# Altium footprint library WE-VD.PcbLib: 120 footprints (part 3 of 8)
Each footprint in its own frame and in the unit in brackets; x right, y up, seen from the top. Pads: shape width x height; smd on the part's side, far side on the other; paste and mask are expansions set on the pad; w line width, h text height; cw(c..) or ccw(c..) is an arc to the next point about the centre after c.
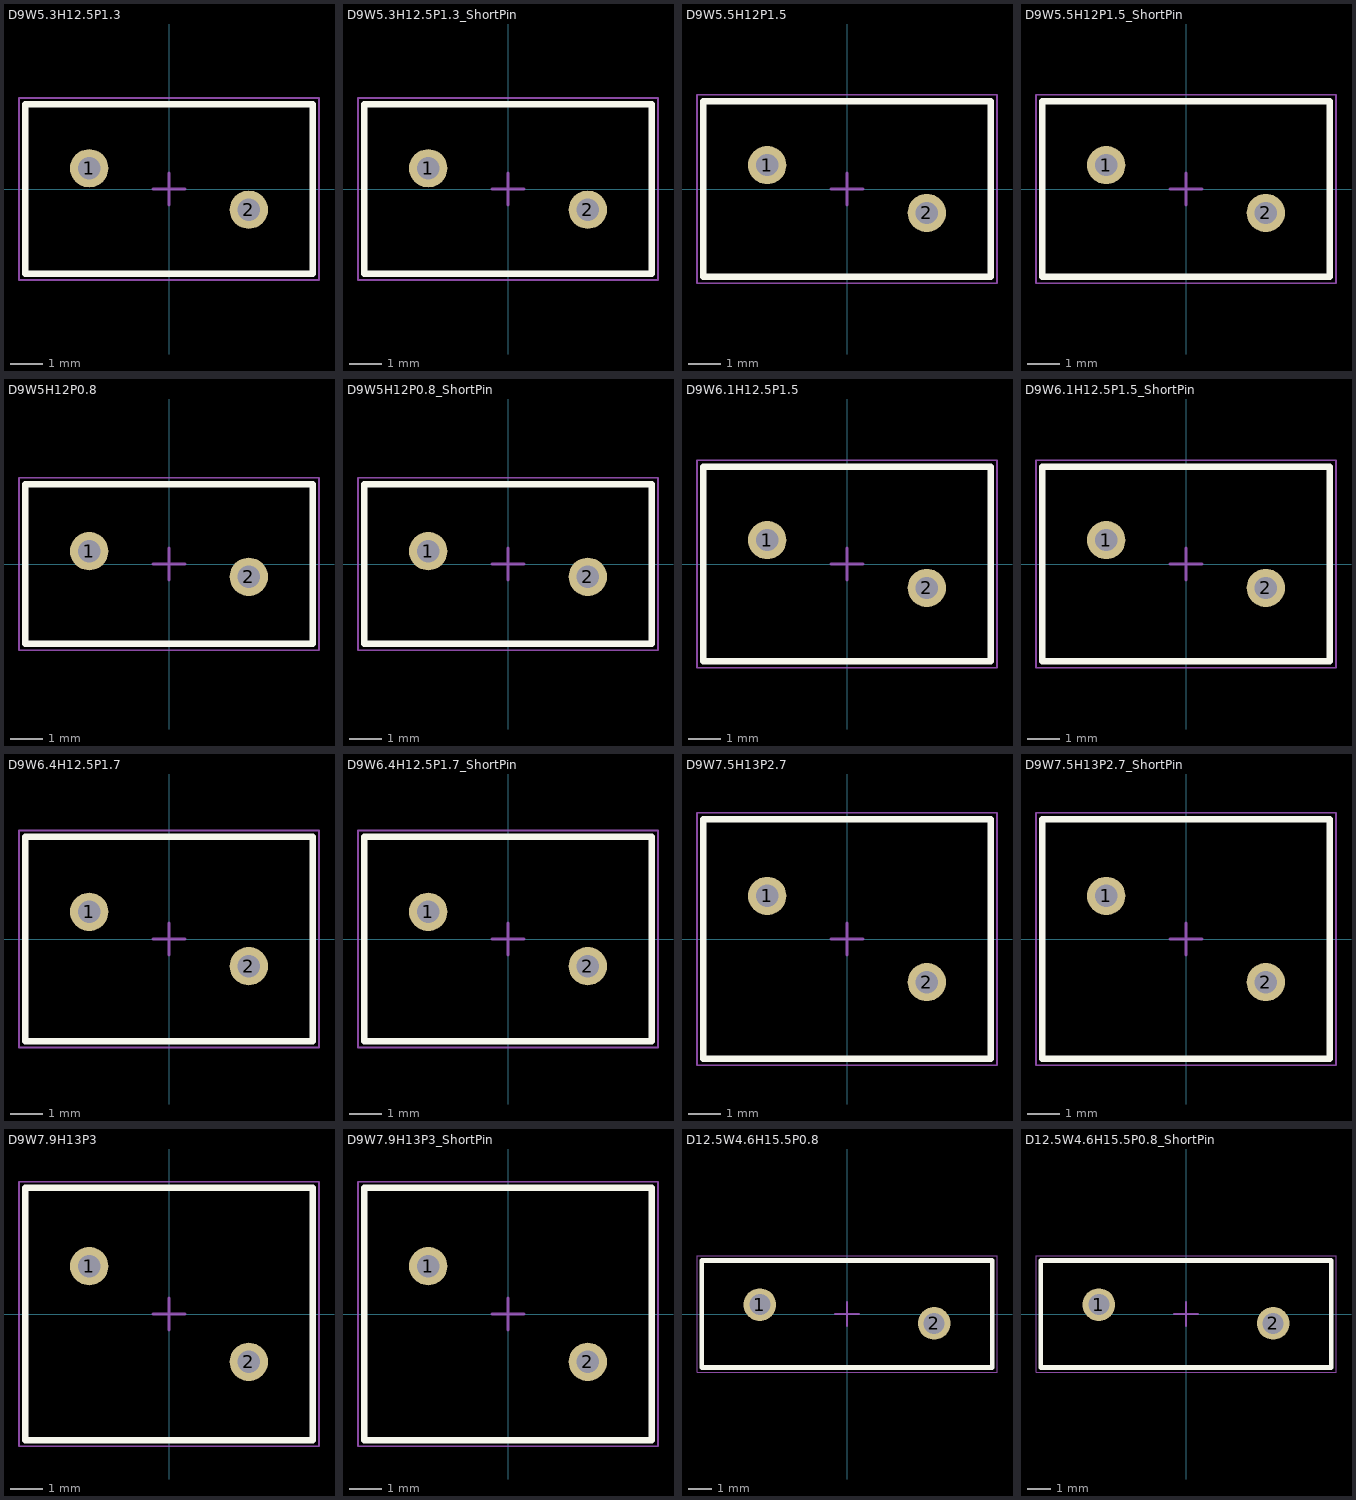
[diagram p2: the footprints below, top view; thin cyan lines are the x and y axes]

## D9W5.3H12.5P1.3 [mm] "Disk Varistor, Diameter 9mm, Width 5.3mm"
height 12.5
pads (2):
  round 1.2 hole 0.7: 1(-2.5,0.65) 2(2.5,-0.65)
Top Overlay:
  lines w0.2: -4.5,-2.65 -4.5,2.65 4.5,2.65 4.5,-2.65 -4.5,-2.65
Top Assembly:
  lines w0.1: -4.5,-2.65 4.5,-2.65 4.5,2.65 -4.5,2.65 -4.5,-2.65
Top Designator:
  text ".Designator" at -3.647,-0.357 h1
Top 3D Body:
  lines w0.1: -4.5,-2.65 4.5,-2.65 4.5,2.65 -4.5,2.65 -4.5,-2.65
Top Courtyard:
  lines w0.05: -4.7,-2.85 -4.7,2.85 4.7,2.85 4.7,-2.85 -4.7,-2.85
Top Component Center:
  lines w0.1: -0.5,0 0.5,0 ; 0,-0.5 0,0.5
3D body "820x72511.stp": height 9.7, standoff -22.7, extent -3.696,-1.85 3.696,1.85

## D9W5.3H12.5P1.3_ShortPin [mm] "Disk Varistor, Diameter 9mm, Width 5.3mm"
height 12.5
pads (2):
  round 1.2 hole 0.7: 1(-2.5,0.65) 2(2.5,-0.65)
Top Overlay:
  lines w0.2: -4.5,-2.65 4.5,-2.65 4.5,2.65 -4.5,2.65 -4.5,-2.65
Top Assembly:
  lines w0.1: -4.5,-2.65 -4.5,2.65 4.5,2.65 4.5,-2.65 -4.5,-2.65
Top Designator:
  text ".Designator" at -3.647,-0.357 h1
Top 3D Body:
  lines w0.1: -4.5,-2.65 -4.5,2.65 4.5,2.65 4.5,-2.65 -4.5,-2.65
Top Courtyard:
  lines w0.05: -4.7,-2.85 4.7,-2.85 4.7,2.85 -4.7,2.85 -4.7,-2.85
Top Component Center:
  lines w0.1: -0.5,0 0.5,0 ; 0,-0.5 0,0.5
3D body "820572511.stp": height 11.5, standoff -3.1, extent -4.5,-2.65 4.5,2.65

## D9W5.5H12P1.5 [mm] "Disk Varistor, Diameter 9mm, Width 5.5mm"
height 12
pads (2):
  round 1.2 hole 0.7: 1(-2.5,0.75) 2(2.5,-0.75)
Top Overlay:
  lines w0.2: -4.5,-2.75 4.5,-2.75 4.5,2.75 -4.5,2.75 -4.5,-2.75
Top Assembly:
  lines w0.1: -4.5,-2.75 -4.5,2.75 4.5,2.75 4.5,-2.75 -4.5,-2.75
Top Designator:
  text ".Designator" at -3.647,-0.357 h1
Top 3D Body:
  lines w0.1: -4.5,-2.75 -4.5,2.75 4.5,2.75 4.5,-2.75 -4.5,-2.75
Top Courtyard:
  lines w0.05: -4.7,-2.95 4.7,-2.95 4.7,2.95 -4.7,2.95 -4.7,-2.95
Top Component Center:
  lines w0.1: -0.5,0 0.5,0 ; 0,-0.5 0,0.5
3D body "820x74001.stp": height 9.7, standoff -22.7, extent -3.696,-1.9 3.696,1.9

## D9W5.5H12P1.5_ShortPin [mm] "Disk Varistor, Diameter 9mm, Width 5.5mm"
height 12
pads (2):
  round 1.2 hole 0.7: 1(-2.5,0.75) 2(2.5,-0.75)
Top Overlay:
  lines w0.2: -4.5,-2.75 -4.5,2.75 4.5,2.75 4.5,-2.75 -4.5,-2.75
Top Assembly:
  lines w0.1: -4.5,-2.75 4.5,-2.75 4.5,2.75 -4.5,2.75 -4.5,-2.75
Top Designator:
  text ".Designator" at -3.647,-0.357 h1
Top 3D Body:
  lines w0.1: -4.5,-2.75 4.5,-2.75 4.5,2.75 -4.5,2.75 -4.5,-2.75
Top Courtyard:
  lines w0.05: -4.7,-2.95 -4.7,2.95 4.7,2.95 4.7,-2.95 -4.7,-2.95
Top Component Center:
  lines w0.1: -0.5,0 0.5,0 ; 0,-0.5 0,0.5
3D body "820574001.stp": height 11.5, standoff -3.1, extent -4.5,-2.75 4.5,2.75

## D9W5H12P0.8 [mm] "Disk Varistor, Diameter 9mm, Width 5mm"
height 12
pads (2):
  round 1.2 hole 0.7: 1(-2.5,0.4) 2(2.5,-0.4)
Top Overlay:
  lines w0.2: -4.5,-2.5 -4.5,2.5 4.5,2.5 4.5,-2.5 -4.5,-2.5
Top Assembly:
  lines w0.1: -4.5,-2.5 4.5,-2.5 4.5,2.5 -4.5,2.5 -4.5,-2.5
Top Designator:
  text ".Designator" at -3.647,-0.357 h1
Top 3D Body:
  lines w0.1: -4.5,-2.5 4.5,-2.5 4.5,2.5 -4.5,2.5 -4.5,-2.5
Top Courtyard:
  lines w0.05: -4.7,-2.7 -4.7,2.7 4.7,2.7 4.7,-2.7 -4.7,-2.7
Top Component Center:
  lines w0.1: -0.5,0 0.5,0 ; 0,-0.5 0,0.5
3D body "820x73001.stp": height 9.7, standoff -22.7, extent -3.696,-1.6 3.696,1.6

## D9W5H12P0.8_ShortPin [mm] "Disk Varistor, Diameter 9mm, Width 5mm"
height 12
pads (2):
  round 1.2 hole 0.7: 1(-2.5,0.4) 2(2.5,-0.4)
Top Overlay:
  lines w0.2: -4.5,-2.5 4.5,-2.5 4.5,2.5 -4.5,2.5 -4.5,-2.5
Top Assembly:
  lines w0.1: -4.5,-2.5 -4.5,2.5 4.5,2.5 4.5,-2.5 -4.5,-2.5
Top Designator:
  text ".Designator" at -3.647,-0.357 h1
Top 3D Body:
  lines w0.1: -4.5,-2.5 -4.5,2.5 4.5,2.5 4.5,-2.5 -4.5,-2.5
Top Courtyard:
  lines w0.05: -4.7,-2.7 4.7,-2.7 4.7,2.7 -4.7,2.7 -4.7,-2.7
Top Component Center:
  lines w0.1: -0.5,0 0.5,0 ; 0,-0.5 0,0.5
3D body "820573001.stp": height 11.5, standoff -3.1, extent -4.5,-2.5 4.5,2.5

## D9W6.1H12.5P1.5 [mm] "Disk Varistor, Diameter 9mm, Width 6.1mm"
height 12.5
pads (2):
  round 1.2 hole 0.7: 1(-2.5,0.75) 2(2.5,-0.75)
Top Overlay:
  lines w0.2: -4.5,-3.05 4.5,-3.05 4.5,3.05 -4.5,3.05 -4.5,-3.05
Top Assembly:
  lines w0.1: -4.5,-3.05 -4.5,3.05 4.5,3.05 4.5,-3.05 -4.5,-3.05
Top Designator:
  text ".Designator" at -3.647,-0.357 h1
Top 3D Body:
  lines w0.1: -4.5,-3.05 -4.5,3.05 4.5,3.05 4.5,-3.05 -4.5,-3.05
Top Courtyard:
  lines w0.05: -4.7,-3.25 4.7,-3.25 4.7,3.25 -4.7,3.25 -4.7,-3.25
Top Component Center:
  lines w0.1: -0.5,0 0.5,0 ; 0,-0.5 0,0.5
3D body "820x72711.stp": height 9.7, standoff -22.7, extent -3.696,-1.95 3.696,1.95

## D9W6.1H12.5P1.5_ShortPin [mm] "Disk Varistor, Diameter 9mm, Width 6.1mm"
height 12.5
pads (2):
  round 1.2 hole 0.7: 1(-2.5,0.75) 2(2.5,-0.75)
Top Overlay:
  lines w0.2: -4.5,-3.05 -4.5,3.05 4.5,3.05 4.5,-3.05 -4.5,-3.05
Top Assembly:
  lines w0.1: -4.5,-3.05 4.5,-3.05 4.5,3.05 -4.5,3.05 -4.5,-3.05
Top Designator:
  text ".Designator" at -3.647,-0.357 h1
Top 3D Body:
  lines w0.1: -4.5,-3.05 4.5,-3.05 4.5,3.05 -4.5,3.05 -4.5,-3.05
Top Courtyard:
  lines w0.05: -4.7,-3.25 -4.7,3.25 4.7,3.25 4.7,-3.25 -4.7,-3.25
Top Component Center:
  lines w0.1: -0.5,0 0.5,0 ; 0,-0.5 0,0.5
3D body "820572711.stp": height 12, standoff -3.1, extent -4.5,-3.05 4.5,3.05

## D9W6.4H12.5P1.7 [mm] "Disk Varistor, Diameter 9mm, Width 6.4mm"
height 12.5
pads (2):
  round 1.2 hole 0.7: 1(-2.5,0.85) 2(2.5,-0.85)
Top Overlay:
  lines w0.2: -4.5,-3.2 4.5,-3.2 4.5,3.2 -4.5,3.2 -4.5,-3.2
Top Assembly:
  lines w0.1: -4.5,-3.2 -4.5,3.2 4.5,3.2 4.5,-3.2 -4.5,-3.2
Top Designator:
  text ".Designator" at -3.647,-0.357 h1
Top 3D Body:
  lines w0.1: -4.5,-3.2 -4.5,3.2 4.5,3.2 4.5,-3.2 -4.5,-3.2
Top Courtyard:
  lines w0.05: -4.7,-3.4 4.7,-3.4 4.7,3.4 -4.7,3.4 -4.7,-3.4
Top Component Center:
  lines w0.1: -0.5,0 0.5,0 ; 0,-0.5 0,0.5
3D body "820x73011.stp": height 9.7, standoff -22.7, extent -3.696,-2.05 3.696,2.05

## D9W6.4H12.5P1.7_ShortPin [mm] "Disk Varistor, Diameter 9mm, Width 6.4mm"
height 12.5
pads (2):
  round 1.2 hole 0.7: 1(-2.5,0.85) 2(2.5,-0.85)
Top Overlay:
  lines w0.2: -4.5,-3.2 -4.5,3.2 4.5,3.2 4.5,-3.2 -4.5,-3.2
Top Assembly:
  lines w0.1: -4.5,-3.2 4.5,-3.2 4.5,3.2 -4.5,3.2 -4.5,-3.2
Top Designator:
  text ".Designator" at -3.647,-0.357 h1
Top 3D Body:
  lines w0.1: -4.5,-3.2 4.5,-3.2 4.5,3.2 -4.5,3.2 -4.5,-3.2
Top Courtyard:
  lines w0.05: -4.7,-3.4 -4.7,3.4 4.7,3.4 4.7,-3.4 -4.7,-3.4
Top Component Center:
  lines w0.1: -0.5,0 0.5,0 ; 0,-0.5 0,0.5
3D body "820573011.stp": height 12, standoff -3.1, extent -4.5,-3.2 4.5,3.2

## D9W7.5H13P2.7 [mm] "Disk Varistor, Diameter 9mm, Width 7.5mm"
height 13
pads (2):
  round 1.2 hole 0.7: 1(-2.5,1.35) 2(2.5,-1.35)
Top Overlay:
  lines w0.2: -4.5,-3.75 4.5,-3.75 4.5,3.75 -4.5,3.75 -4.5,-3.75
Top Assembly:
  lines w0.1: -4.5,-3.75 -4.5,3.75 4.5,3.75 4.5,-3.75 -4.5,-3.75
Top Designator:
  text ".Designator" at -3.647,-0.357 h1
Top 3D Body:
  lines w0.1: -4.5,-3.75 -4.5,3.75 4.5,3.75 4.5,-3.75 -4.5,-3.75
Top Courtyard:
  lines w0.05: -4.7,-3.95 4.7,-3.95 4.7,3.95 -4.7,3.95 -4.7,-3.95
Top Component Center:
  lines w0.1: -0.5,0 0.5,0 ; 0,-0.5 0,0.5
3D body "820x74211.stp": height 9.85, standoff -22.55, extent -3.696,-2.55 3.696,2.55

## D9W7.5H13P2.7_ShortPin [mm] "Disk Varistor, Diameter 9mm, Width 7.5mm"
height 13
pads (2):
  round 1.2 hole 0.7: 1(-2.5,1.35) 2(2.5,-1.35)
Top Overlay:
  lines w0.2: -4.5,-3.75 -4.5,3.75 4.5,3.75 4.5,-3.75 -4.5,-3.75
Top Assembly:
  lines w0.1: -4.5,-3.75 4.5,-3.75 4.5,3.75 -4.5,3.75 -4.5,-3.75
Top Designator:
  text ".Designator" at -3.647,-0.357 h1
Top 3D Body:
  lines w0.1: -4.5,-3.75 4.5,-3.75 4.5,3.75 -4.5,3.75 -4.5,-3.75
Top Courtyard:
  lines w0.05: -4.7,-3.95 -4.7,3.95 4.7,3.95 4.7,-3.95 -4.7,-3.95
Top Component Center:
  lines w0.1: -0.5,0 0.5,0 ; 0,-0.5 0,0.5
3D body "820574211.stp": height 12.5, standoff -3.1, extent -4.5,-3.75 4.5,3.75

## D9W7.9H13P3 [mm] "Disk Varistor, Diameter 9mm, Width 7.9mm"
height 13
pads (2):
  round 1.2 hole 0.7: 1(-2.5,1.5) 2(2.5,-1.5)
Top Overlay:
  lines w0.2: -4.5,-3.95 4.5,-3.95 4.5,3.95 -4.5,3.95 -4.5,-3.95
Top Assembly:
  lines w0.1: -4.5,-3.95 -4.5,3.95 4.5,3.95 4.5,-3.95 -4.5,-3.95
Top Designator:
  text ".Designator" at -3.647,-0.357 h1
Top 3D Body:
  lines w0.1: -4.5,-3.95 -4.5,3.95 4.5,3.95 4.5,-3.95 -4.5,-3.95
Top Courtyard:
  lines w0.05: -4.7,-4.15 4.7,-4.15 4.7,4.15 -4.7,4.15 -4.7,-4.15
Top Component Center:
  lines w0.1: -0.5,0 0.5,0 ; 0,-0.5 0,0.5
3D body "820x74611.stp": height 9.85, standoff -22.55, extent -3.696,-2.75 3.696,2.75

## D9W7.9H13P3_ShortPin [mm] "Disk Varistor, Diameter 9mm, Width 7.9mm"
height 13
pads (2):
  round 1.2 hole 0.7: 1(-2.5,1.5) 2(2.5,-1.5)
Top Overlay:
  lines w0.2: -4.5,-3.95 -4.5,3.95 4.5,3.95 4.5,-3.95 -4.5,-3.95
Top Assembly:
  lines w0.1: -4.5,-3.95 4.5,-3.95 4.5,3.95 -4.5,3.95 -4.5,-3.95
Top Designator:
  text ".Designator" at -3.647,-0.357 h1
Top 3D Body:
  lines w0.1: -4.5,-3.95 4.5,-3.95 4.5,3.95 -4.5,3.95 -4.5,-3.95
Top Courtyard:
  lines w0.05: -4.7,-4.15 -4.7,4.15 4.7,4.15 4.7,-4.15 -4.7,-4.15
Top Component Center:
  lines w0.1: -0.5,0 0.5,0 ; 0,-0.5 0,0.5
3D body "820474611.stp": height 12.5, standoff -3.1, extent -4.5,-3.95 4.5,3.95

## D12.5W4.6H15.5P0.8 [mm] "Disk Varistor, Diameter 12.5mm, Width 4.6mm"
height 15.5
pads (2):
  round 1.4 hole 0.9: 1(-3.75,0.4) 2(3.75,-0.4)
Top Overlay:
  lines w0.2: -6.25,-2.3 6.25,-2.3 6.25,2.3 -6.25,2.3 -6.25,-2.3
Top Assembly:
  lines w0.1: -6.25,-2.3 -6.25,2.3 6.25,2.3 6.25,-2.3 -6.25,-2.3
Top Designator:
  text ".Designator" at -3.647,-0.357 h1
Top 3D Body:
  lines w0.1: -6.25,-2.3 -6.25,2.3 6.25,2.3 6.25,-2.3 -6.25,-2.3
Top Courtyard:
  lines w0.05: -6.45,-2.5 6.45,-2.5 6.45,2.5 -6.45,2.5 -6.45,-2.5
Top Component Center:
  lines w0.1: -0.5,0 0.5,0 ; 0,-0.5 0,0.5
3D body "820x11311.stp": height 13.4, standoff -22.6, extent -5.5,-1.676 5.5,1.675

## D12.5W4.6H15.5P0.8_ShortPin [mm] "Disk Varistor, Diameter 12.5mm, Width 4.6mm"
height 15.5
pads (2):
  round 1.4 hole 0.9: 1(-3.75,0.4) 2(3.75,-0.4)
Top Overlay:
  lines w0.2: -6.25,-2.3 -6.25,2.3 6.25,2.3 6.25,-2.3 -6.25,-2.3
Top Assembly:
  lines w0.1: -6.25,-2.3 6.25,-2.3 6.25,2.3 -6.25,2.3 -6.25,-2.3
Top Designator:
  text ".Designator" at -3.647,-0.357 h1
Top 3D Body:
  lines w0.1: -6.25,-2.3 6.25,-2.3 6.25,2.3 -6.25,2.3 -6.25,-2.3
Top Courtyard:
  lines w0.05: -6.45,-2.5 -6.45,2.5 6.45,2.5 6.45,-2.5 -6.45,-2.5
Top Component Center:
  lines w0.1: -0.5,0 0.5,0 ; 0,-0.5 0,0.5
3D body "820511311.stp": height 15.54, standoff -3.05, extent -6.25,-2.3 6.25,2.3